# Altium schematic symbol library Diodes.SchLib: 9 symbols
Pins are listed as number, name and electrical type; pins without a type are passive.

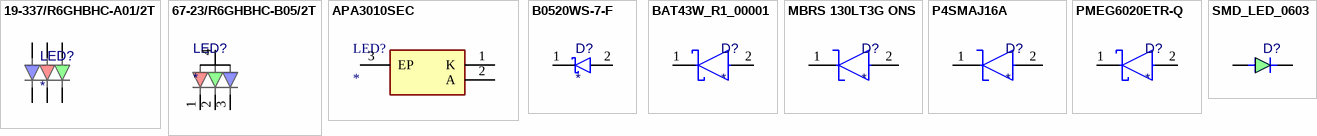
[diagram p0: symbols 19-337/R6GHBHC-A01/2T to SMD_LED_0603]

## 19-337/R6GHBHC-A01/2T
designator LED?
0.35mm Height Chip LED with Full Color, Everlight, 1616 SMD; Supplier 1: Digikey; Supplier Part Number 1: 1080-19-337/R6GHBHC-A01/2TCT-ND
footprint RGB_SMD_1616 (3.5mm height, 1.6mm x 1.6mm, 6-pad, RGB)
pins: 1, 2, 3, 4, 5, 6

## 67-23/R6GHBHC-B05/2T
designator LED?
LED, SMD 3528 (1411), PLCC4, RGB, 180 ... 715 mcd, 120°
footprint 67-23/R6GHBHC-B05/2T
pins: 1, 2, 3, 4

## APA3010SEC
designator LED?
LED; Manufacturer_Name: Kingbright; Manufacturer_Part_Number: APA3010SEC; Datasheet Link: https://eu.mouser.com/datasheet/2/216/APA3010SEC-1658.pdf; Height: 1.15mm; Mouser Part Number: 604-APA3010SEC; Mouser Price/Stock: https://www.mouser.co.uk/ProductDetail/Kingbright/APA3010SEC?qs=SxaZfIVsCL356Ej6LlYSSg%3D%3D
footprint APA3010SEC
pins: 1 K, 2 A, 3 EP

## B0520WS-7-F
designator D?
DIODE SCHOTTKY 20V 500MA SOD323
footprint SOD323 (Diode directional 1.7mm x 1.3mm)
pins: 1, 2

## BAT43W_R1_00001
designator D?
Schottky Diodes & Rectifiers 30V,Schottky,SOD-123,0.2A; Supplier Part Number 1: 3757-BAT43W_R1_00001CT-ND; Supplier 1: Digikey
footprint SOD123 (ref. to BAT43W_R1_00001 specs)
pins: 1, 2

## MBRS 130LT3G ONS
designator D?
Schottky-Barrier-Rectifier, 30V, 1,0 A, DO-214AA/SMB
footprint DO-214AC
pins: 1, 2

## P4SMAJ16A
designator D?
P4SMAJ16A - SMD Transient Voltage Suppressor Diodes
footprint DO-214AC
pins: 1, 2

## PMEG6020ETR-Q
designator D?
plastic, surface mounted package; 2 terminals; 2.6 mm x / 1.7 mm x 1 mm body
footprint SOD123 (ref. to BAT43W_R1_00001 specs)
pins: 1, 2

## SMD_LED_0603
designator D?  (value not drawn)
footprint SMD_LED_0603 (Generic 0603 SMD LED. Based on "KP-1608SGD SUPER BRIGHT GREEN")
pins: 1, 2